# Altium footprint library Connector.PcbLib: 272 footprints (part 12 of 17)
Each footprint in its own frame and in the unit in brackets; x right, y up, seen from the top. Pads: shape width x height; smd on the part's side, far side on the other; paste and mask are expansions set on the pad; w line width, h text height; cw(c..) or ccw(c..) is an arc to the next point about the centre after c.
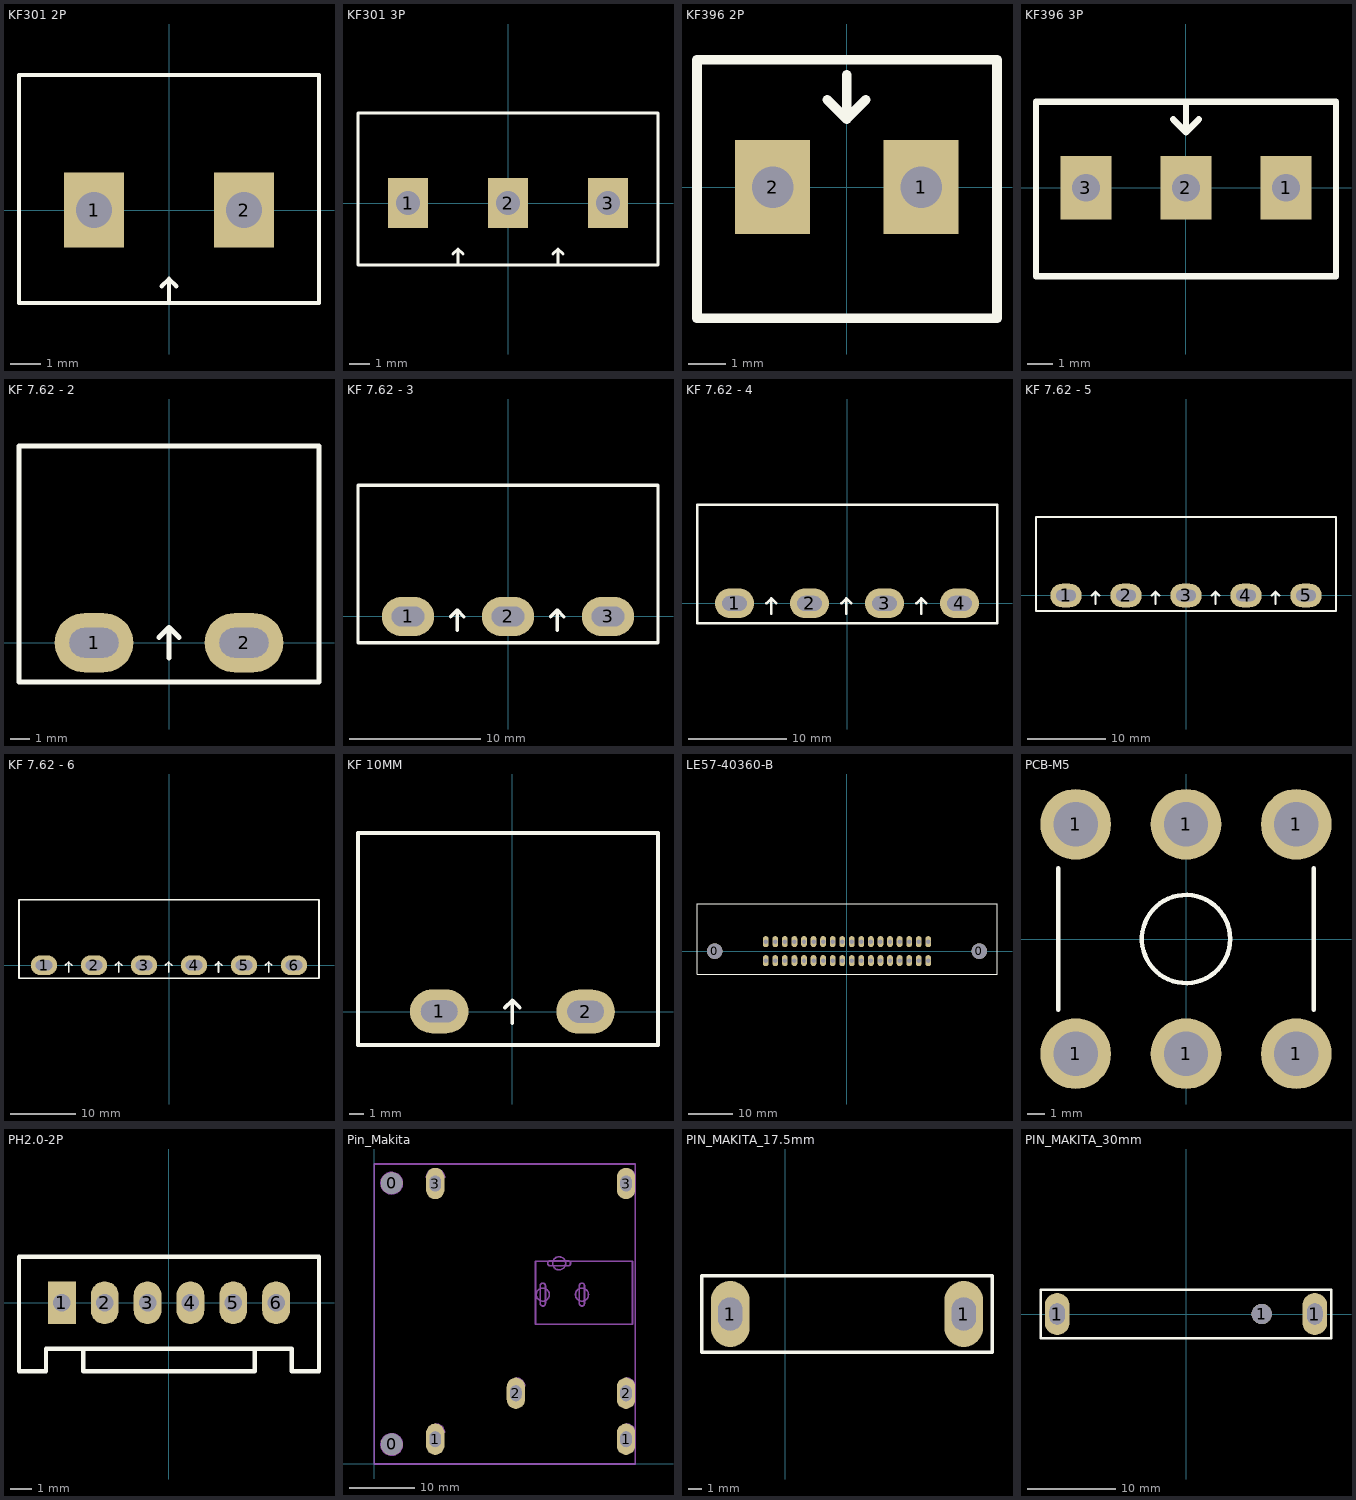
[diagram p11: the footprints below, top view; thin cyan lines are the x and y axes]

## KF301 2P [mm]
pads (2):
  rect 2x2.5 hole 1.2: 1(-2.5,0) 2(2.5,0)
Top Overlay:
  lines w0.15: -0.25,-2.543 0,-2.3 ; 0,-3.1 0,-2.3 ; 0.25,-2.543 0,-2.3 ; -5,-3.1 -5,4.5 5,4.5 5,-3.1 -5,-3.1
Top Designator:
  text ".Designator" at -3.961,0.369 h1.52
Mechanical 15:
  text ".Designator" at -4.849,-0.452 h2
3D body "User Library-Terminal-Screw-3A-2way.step": height 10.01, standoff -2.99, extent -5.576,-3 5.024,4.6

## KF301 3P [mm]
pads (3):
  rect 2x2.5 hole 1.2: 1(-5,0) 2(0.006,0) 3(5,0)
Top Overlay:
  lines w0.15: -2.75,-2.543 -2.5,-2.3 ; -2.5,-3.1 -2.5,-2.3 ; -2.25,-2.543 -2.5,-2.3 ; 2.256,-2.543 2.506,-2.3 ; 2.506,-3.1 2.506,-2.3 ; 2.756,-2.543 2.506,-2.3 ; -7.5,-3.1 -7.5,4.5 7.5,4.5 7.5,-3.1 -7.5,-3.1
Top Designator:
  text ".Designator" at -3.963,0.369 h1.52
3D body "User Library-Terminal-Screw-3A-3way.STEP": height 10.01, standoff -2.99, extent -8.079,-3 7.521,4.6

## KF396 2P [mm]
pads (2):
  rect 2x2.5 hole 1.1: 1(1.98,0) 2(-1.98,0)
Top Overlay:
  lines w0.254: -0.521,2.324 -0.013,1.816 ; -0.013,2.99 -0.013,1.816 ; 0.495,2.324 -0.013,1.816 ; -4,-3.5 4,-3.5 4,3.4 -4,3.4 -4,-3.5
Top Designator:
  text ".Designator" at -3.71,-0.394 h1.52
3D body "DG350-3.96-02P-12-00AH.STEP": height 8.5, standoff -3.4, extent -4,-3.45 4,3.35

## KF396 3P [mm]
pads (3):
  rect 2x2.5 hole 1.1: 1(3.96,0) 2(0,0) 3(-3.96,0)
Top Overlay:
  lines w0.254: -0.508,2.705 0,2.197 ; 0,3.371 0,2.197 ; 0.508,2.705 0,2.197 ; -5.94,-3.5 -5.94,3.4 5.94,3.4 5.94,-3.5 -5.94,-3.5
Top Designator:
  text ".Designator" at -3.71,-0.394 h1.52
3D body "DG350-3.96-03P-12-00AH.STEP": height 8.5, standoff -3.4, extent -5.75,-3.45 5.75,3.35

## KF 7.62 - 2 [mm]
pads (2):
  oval 4x3 hole 1.5 slot 2.5 at 0 deg: 1(-3.81,0) 2(3.81,0)
Top Overlay:
  lines w0.254: -7.62,-2 -7.62,10 7.62,10 7.62,-1.992 -7.62,-1.992 ; -0.508,0.273 0,0.781 ; 0,-0.781 0,0.781 ; 0.508,0.273 0,0.781
Top Designator:
  text ".Designator" at -3.774,3.656 h1.52
3D body "KF7_62-2P.STEP": height 12.4, standoff -6.3, extent -7.62,-1.992 7.62,10.008

## KF 7.62 - 3 [mm]
pads (3):
  oval 4x3 hole 1.5 slot 2.5 at 0 deg: 1(-7.62,0) 2(0,0) 3(7.62,0)
Top Overlay:
  lines w0.254: -11.43,-2 -11.43,10 11.43,10 11.43,-2 ; -11.43,-1.992 11.43,-1.992 ; -4.381,-0.013 -3.873,0.495 ; -3.873,-1.067 -3.873,0.495 ; -3.365,-0.013 -3.873,0.495 ; 3.238,-0.013 3.746,0.495 ; 3.746,-1.067 3.746,0.495 ; 4.255,-0.013 3.746,0.495
Top Designator:
  text ".Designator" at -3.71,3.656 h1.52
3D body "KF7_62-3P.STEP": height 12.4, standoff -6.3, extent -11.632,-2 11.633,10

## KF 7.62 - 4 [mm]
pads (4):
  oval 4x3 hole 1.5 slot 2.5 at 0 deg: 1(-11.43,0) 2(-3.81,0) 3(3.81,0) 4(11.43,0)
Top Overlay:
  lines w0.254: -8.191,-0.013 -7.683,0.495 ; -7.683,-1.067 -7.683,0.495 ; -7.175,-0.013 -7.683,0.495 ; -0.572,-0.013 -0.064,0.495 ; -0.064,-1.067 -0.064,0.495 ; 0.445,-0.013 -0.064,0.495 ; 7.048,-0.013 7.556,0.495 ; 7.556,-1.067 7.556,0.495 ; 8.064,-0.013 7.556,0.495 ; -15.24,-2 -15.24,10 15.24,10 15.24,-2 -15.24,-2
Top Designator:
  text ".Designator" at -3.71,3.656 h1.52
3D body "KF7_62-4P.STEP": height 12.4, standoff -6.3, extent -15.24,-2 15.24,10

## KF 7.62 - 5 [mm]
pads (5):
  oval 4x3 hole 1.5 slot 2.5 at 0 deg: 1(-15.24,0) 2(-7.62,0) 3(0,0) 4(7.62,0) 5(15.24,0)
Top Overlay:
  lines w0.254: -12.002,-0.013 -11.493,0.495 ; -11.493,-1.067 -11.493,0.495 ; -10.986,-0.013 -11.493,0.495 ; -4.381,-0.013 -3.873,0.495 ; -3.873,-1.067 -3.873,0.495 ; -3.365,-0.013 -3.873,0.495 ; 3.238,-0.013 3.746,0.495 ; 3.746,-1.067 3.746,0.495 ; 4.255,-0.013 3.746,0.495 ; 10.858,-0.013 11.367,0.495 ; 11.367,-1.067 11.367,0.495 ; 11.874,-0.013 11.367,0.495 ; -19.05,-2 19.05,-2 19.05,10 -19.05,10 -19.05,-2
Top Designator:
  text ".Designator" at -3.71,3.656 h1.52
3D body "KF7_62-3P.STEP": height 12.4, standoff -6.3, extent -19.252,-2 4.013,10
3D body "KF7_62-2P.STEP": height 12.4, standoff -6.3, extent 3.81,-1.992 19.05,10.008

## KF 7.62 - 6 [mm]
pads (6):
  oval 4x3 hole 1.5 slot 2.5 at 0 deg: 1(-19.05,0) 2(-11.43,0) 3(-3.81,0) 4(3.81,0) 5(11.43,0) 6(19.05,0)
Top Overlay:
  lines w0.254: -15.811,-0.013 -15.303,0.495 ; -15.303,-1.067 -15.303,0.495 ; -14.795,-0.013 -15.303,0.495 ; -8.191,-0.013 -7.683,0.495 ; -7.683,-1.067 -7.683,0.495 ; -7.175,-0.013 -7.683,0.495 ; -0.572,-0.013 -0.064,0.495 ; -0.064,-1.067 -0.064,0.495 ; 0.445,-0.013 -0.064,0.495 ; 7.048,-0.013 7.556,0.495 ; 7.556,-1.067 7.556,0.495 ; 8.064,-0.013 7.556,0.495 ; 14.668,-0.013 15.176,0.495 ; 15.176,-1.067 15.176,0.495 ; 15.684,-0.013 15.176,0.495 ; -22.86,-2 22.86,-2 22.86,10 -22.86,10 -22.86,-2
Top Designator:
  text ".Designator" at -3.71,3.656 h1.52
3D body "KF7_62-3P.STEP": height 12.4, standoff -6.3, extent -0.202,-2 23.063,10
3D body "KF7_62-3P.STEP": height 12.4, standoff -6.3, extent -23.062,-2 0.203,10

## KF 10MM [mm]
pads (2):
  oval 4x3 hole 1.5 slot 2.5 at 0 deg: 1(-5,0.006) 2(5,-0.006)
Top Overlay:
  lines w0.254: -0.508,0.267 0,0.775 ; 0,-0.787 0,0.775 ; 0.508,0.267 0,0.775 ; -10.55,-2.294 -10.55,12.206 9.95,12.206 9.95,-2.294 -10.55,-2.294
Top Designator:
  text ".Designator" at -4.9,3.662 h1.52
3D body "User Library-KF1000-2P.STEP": height 14.81, standoff -8.99, extent -10.55,-2.294 9.95,12.206

## LE57-40360-B [mm]
pads (38):
  round 3.5 hole 3.5 mask+0.102: 0(-29.871,0) 0(29.872,0)
  oval 1.3x2.5 hole 1 mask+0.102: 1(-18.351,-2.145) 2(-16.192,-2.145) 3(-14.033,-2.145) 4(-11.874,-2.145) 5(-9.715,-2.145) 6(-7.556,-2.145) 7(-5.397,-2.145) 8(-3.238,-2.145) 9(-1.079,-2.145) 10(1.08,-2.145) 11(3.239,-2.145) 12(5.398,-2.145) 13(7.557,-2.145) 14(9.716,-2.145) 15(11.875,-2.145) 16(14.034,-2.145) 17(16.193,-2.145) 18(18.352,-2.145) 19(-18.351,2.145) 20(-16.192,2.145) 21(-14.033,2.145) 22(-11.874,2.145) 23(-9.715,2.145) 24(-7.556,2.145) 25(-5.397,2.145) 26(-3.238,2.145) 27(-1.079,2.145) 28(1.08,2.145) 29(3.239,2.145) 30(5.398,2.145) 31(7.557,2.145) 32(9.716,2.145) 33(11.875,2.145) 34(14.034,2.145) 35(16.193,2.145) 36(18.352,2.145)
Top Overlay:
  lines w0.254: -33.871,10.73 -33.871,0 -33.871,-5.27 33.872,-5.27 33.872,0 33.872,10.73 -33.659,10.73
Top Designator:
  text ".Designator" at -3.71,2.386 h1.52

## PCB-M5 [mm]
pads (6):
  round 4 hole 2.5: 1(-6.25,-6.5) 1(-6.25,6.5) 1(0,-6.5) 1(0,6.5) 1(6.25,-6.5) 1(6.25,6.5)
Top Overlay:
  circle w0.254: c0,0 r2.5
  lines w0.254: -7.25,-4 -7.25,4 ; 7.25,-4 7.25,4
3D body "Wire Connection Terminal PCB M5 14.5x14.stp": height 15.63, standoff -2.9, extent -7.25,-7.25 7.25,7.25

## PH2.0-2P [mm]
pads (6):
  rect 1.3x2 hole 0.82: 1(-5,0)
  oval 1.3x2 hole 0.82: 2(-3,0) 3(-1,0) 4(1,0) 5(3,0) 6(5,0)
Top Overlay:
  lines w0.2: -4,-2.15 -4,-3.2 4,-3.2 4,-2.15 ; 7,-3.2 7,2.15 -7,2.15 -7,-3.2 -5.737,-3.2 -5.737,-2.15 5.731,-2.15 5.731,-3.2 7.001,-3.2
Top Designator:
  text ".Designator" at -3.71,-0.869 h1.52

## Pin_Makita [mm] "3 Pin"
pads (8):
  round 3.3 hole 3.3: 0(2.66,2.996) 0(2.66,43.058)
  oval 2.8x4.8 hole 1.75 slot 2.4 at 90 deg: 1(9.345,3.8) 1(38.6,3.8) 2(21.701,10.851) 2(38.6,10.851) 3(9.345,43) 3(38.6,43)
Top Designator:
  text ".Designator" at 16.29,22.656 h1.52
Mechanical 8:
  circle w0.254: c31.838,25.972 r1
  circle w0.254: c25.838,25.972 r1
  circle w0.254: c28.338,30.772 r1
  circle w0.254: c2.66,43.058 r1.65
  circle w0.254: c2.66,2.996 r1.65
  lines w0.254: 7.975,43.874 cw(c9.376,43.874) 10.776,43.874 ; 9.447,6.141 cw(c9.376,4.743) 10.766,4.914 ; 10.766,44.045 cw(c9.368,43.875) 10.774,43.948 ; 21.772,13.192 cw(c21.7,11.793) 23.09,11.965 ; 38.671,6.141 cw(c38.6,4.743) 39.99,4.914 ; 38.671,13.192 cw(c38.6,11.793) 39.99,11.965 ; 38.671,45.272 cw(c38.6,43.874) 39.99,44.045 ; 0,0 0,46 40,46 40,0 0,0 ; 24.729,21.453 39.579,21.453 39.579,31.073 24.729,31.073 24.729,25.953 24.729,21.453 ; 25.438,24.623 ccw(c25.838,24.623) 26.238,24.623 26.238,27.322 ccw(c25.838,27.322) 25.438,27.322 25.438,24.622 ; 26.989,30.373 cw(c26.989,30.773) 26.989,31.173 29.689,31.173 cw(c29.688,30.773) 29.688,30.373 26.989,30.373 ; 31.438,24.623 ccw(c31.838,24.623) 32.238,24.623 32.238,27.322 ccw(c31.838,27.322) 31.438,27.322 31.438,24.622

## PIN_MAKITA_17.5mm [mm] "17.5x8.2x5.1 mm"
pads (2):
  oval 2.8x4.8 hole 1.75 slot 2.4 at 90 deg: 1(-3.988,13.843) 1(12.912,13.843)
Top Overlay:
  lines w0.254: -6.038,11.093 -6.038,16.593 14.962,16.593 14.962,11.093 -6.038,11.093
Top Designator:
  text ".Designator" at 0.752,13.499 h1.52

## PIN_MAKITA_30mm [mm] "30x8.2x5.1 mm"
pads (3):
  oval 2.8x4.8 hole 1.75 slot 2.4 at 90 deg: 1(-14.627,0) 1(14.627,0)
  round 2.3 hole 2.3: 1(8.602,0)
Top Overlay:
  lines w0.254: -16.5,-2.75 -16.5,2.75 16.5,2.75 16.5,-2.75 -16.5,-2.75
Top Designator:
  text ".Designator" at -3.71,-0.344 h1.52